# Altium schematic symbol library BQ25185DLHR.SchLib: 1 symbol
Pins are listed as number, name and electrical type; pins without a type are passive.

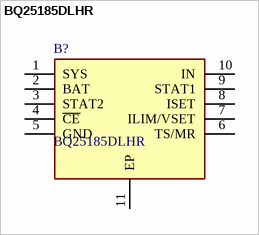
[diagram p0: symbol BQ25185DLHR]

## BQ25185DLHR
designator B?
Battery Management NPI  1-CELL 1A STANDALONE LNR HRGR; Manufacturer_Name: Texas Instruments; Geometry.Height: 0.8mm; Mouser Part Number: 595-BQ25185DLHR; Mouser Price/Stock: https://www.mouser.co.uk/ProductDetail/Texas-Instruments/BQ25185DLHR?qs=Z%252BL2brAPG1IbO%2FV3RqsaPw%3D%3D; Manufacturer_Part_Number: BQ25185DLHR; Datasheet Link: https://www.ti.com/lit/ds/symlink/bq25185.pdf?ts=1706857561339&ref_url=https%253A%252F%252Fwww.ti.com%252Fproduct%252FBQ25185
footprint SON40P220X200X80-11N
pins: 1 SYS, 2 BAT, 3 STAT2, 4 ~{CE}, 5 GND, 6 TS/MR, 7 ILIM/VSET, 8 ISET, 9 STAT1, 10 IN, 11 EP